# Altium footprint library sar.PcbLib: 2 footprints
Each footprint in its own frame and in the unit in brackets; x right, y up, seen from the top. Pads: shape width x height; smd on the part's side, far side on the other; paste and mask are expansions set on the pad; w line width, h text height; cw(c..) or ccw(c..) is an arc to the next point about the centre after c.
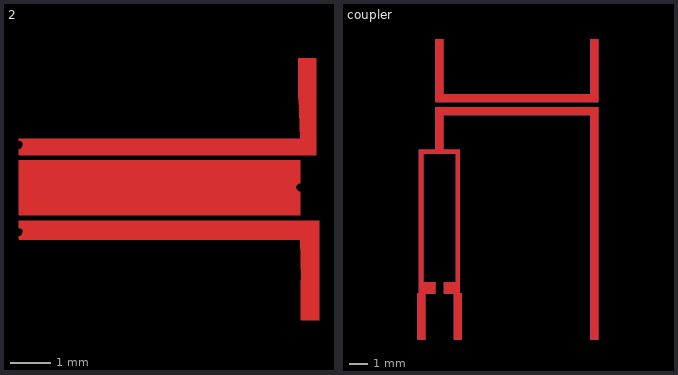
[diagram p0: the footprints below, top view; thin cyan lines are the x and y axes]

## 2 [mm]
Top Layer:
  region: -1269.994,-1265.75 -1269.939,-1265.735 -1269.9,-1265.695 -1269.885,-1265.641 -1269.9,-1265.587 -1269.939,-1265.547 -1269.994,-1265.532 -1269.994,-1265.487 -1263.012,-1265.487 -1263.047,-1264.487 -1263.047,-1263.487 -1262.605,-1263.487 -1262.605,-1265.894 -1269.994,-1265.894
  region: -1269.994,-1267.377 -1269.994,-1266.021 -1263.012,-1266.021 -1263.012,-1266.591 -1263.059,-1266.602 -1263.097,-1266.632 -1263.118,-1266.675 -1263.118,-1266.724 -1263.097,-1266.767 -1263.059,-1266.797 -1263.012,-1266.808 -1263.012,-1267.377
  region: -1269.994,-1267.917 -1269.939,-1267.903 -1269.9,-1267.863 -1269.885,-1267.809 -1269.9,-1267.754 -1269.939,-1267.715 -1269.994,-1267.7 -1269.994,-1267.523 -1262.542,-1267.523 -1262.542,-1269.994 -1262.984,-1269.994 -1262.984,-1268.994 -1263.012,-1267.994 -1269.994,-1267.994
  lines w0.013: -1269.994,-1267.994 -1269.994,-1267.917 -1269.939,-1267.903 -1269.9,-1267.863 -1269.885,-1267.809 -1269.9,-1267.754 -1269.939,-1267.715 -1269.994,-1267.7 -1269.994,-1267.523 -1262.542,-1267.523 -1262.542,-1269.994 -1262.984,-1269.994 -1262.984,-1268.994 -1263.012,-1267.994 -1269.994,-1267.994 ; -1269.994,-1267.377 -1269.994,-1266.021 -1263.012,-1266.021 -1263.012,-1266.591 -1263.059,-1266.602 -1263.097,-1266.632 -1263.118,-1266.675 -1263.118,-1266.724 -1263.097,-1266.767 -1263.059,-1266.797 -1263.012,-1266.808 -1263.012,-1267.377 -1269.994,-1267.377 ; -1269.994,-1265.894 -1269.994,-1265.75 -1269.939,-1265.735 -1269.9,-1265.695 -1269.885,-1265.641 -1269.9,-1265.587 -1269.939,-1265.547 -1269.994,-1265.532 -1269.994,-1265.487 -1263.012,-1265.487 -1263.047,-1264.487 -1263.047,-1263.487 -1262.605,-1263.487 -1262.605,-1265.894 -1269.994,-1265.894

## coupler [mm]
Top Layer:
  region: -1269.994,-1269.994 -1269.994,-1267.504 -1269.893,-1267.504 -1269.893,-1259.693 -1268.994,-1259.693 -1268.994,-1257.394 -1260.16,-1257.394 -1260.16,-1269.994 -1260.564,-1269.994 -1260.564,-1257.794 -1268.59,-1257.794 -1268.59,-1259.693 -1267.691,-1259.693 -1267.691,-1267.504 -1267.59,-1267.504 -1267.59,-1269.994 -1267.994,-1269.994 -1267.994,-1267.504 -1268.542,-1267.504 -1268.542,-1266.904 -1267.893,-1266.904 -1267.893,-1259.895 -1269.691,-1259.895 -1269.691,-1266.904 -1269.042,-1266.904 -1269.042,-1267.504 -1269.59,-1267.504 -1269.59,-1269.994
  region: -1268.994,-1253.674 -1268.59,-1253.674 -1268.59,-1256.674 -1260.564,-1256.674 -1260.564,-1253.674 -1260.16,-1253.674 -1260.16,-1257.074 -1268.994,-1257.074
Mechanical 3:
  lines w0.013: -1269.994,-1269.994 -1269.994,-1267.504 -1269.893,-1267.504 -1269.893,-1259.693 -1268.994,-1259.693 -1268.994,-1257.394 -1260.16,-1257.394 -1260.16,-1269.994 -1260.564,-1269.994 -1260.564,-1257.794 -1268.59,-1257.794 -1268.59,-1259.693 -1267.691,-1259.693 -1267.691,-1267.504 -1267.59,-1267.504 -1267.59,-1269.994 -1267.994,-1269.994 -1267.994,-1267.504 -1268.542,-1267.504 -1268.542,-1266.904 -1267.893,-1266.904 -1267.893,-1259.895 -1269.691,-1259.895 -1269.691,-1266.904 -1269.042,-1266.904 -1269.042,-1267.504 -1269.59,-1267.504 -1269.59,-1269.994 -1269.994,-1269.994 ; -1268.994,-1257.074 -1268.994,-1253.674 -1268.59,-1253.674 -1268.59,-1256.674 -1260.564,-1256.674 -1260.564,-1253.674 -1260.16,-1253.674 -1260.16,-1257.074 -1268.994,-1257.074